# Altium schematic symbol library Jump.SchLib: 10 symbols
Pins are listed as number, name and electrical type; pins without a type are passive.

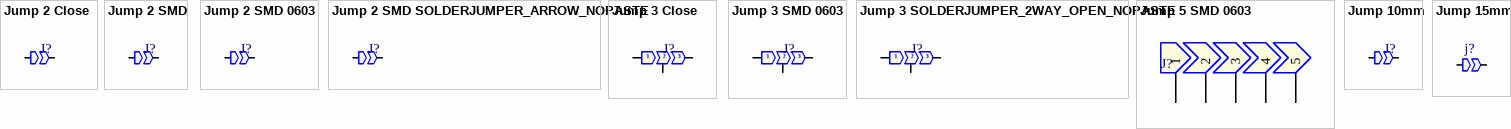
[diagram p0: symbols Jump 2 Close to Jump 15mm]

## Jump 2 Close
designator J?, comment JP2-Close  (value not drawn)
Jumper, 2-Pin, Nho them hang rao; Code: 3504-001; Code_sub1: 3504-028 * 0.05pcs
footprint JUMP2-CLOSED
pins: 1, 2

## Jump 2 SMD
designator J?, comment Jump  (value not drawn)  (no BOM)
Jumper, SMD; Rule: UNIONINDEX=0|RULEKIND=Clearance|NETSCOPE=DifferentNets|LAYERKIND=SameLayer|NAME=Schematic Clearance Constraint|GAP=10mil|GENERICCLEARANCE=10mil|IGNOREPADTOPADCLEARANCEINFOOTPRINT=FALSE|OBJECTCLEARANCES=ClearanceObj_Arc-ClearanceObj_Hole:0;ClearanceObj_Track-ClearanceObj_Hole:0;ClearanceObj_SMDPad-ClearanceObj_Hole:0;ClearanceObj_THPad-ClearanceObj_Hole:0;ClearanceObj_Via-ClearanceObj_Hole:0;ClearanceObj_Fill-ClearanceObj_Hole:0;ClearanceObj_Poly-ClearanceObj_Hole:0;ClearanceObj_Region-ClearanceObj_Region:50000;ClearanceObj_Region-ClearanceObj_Hole:0;ClearanceObj_Text-ClearanceObj_Hole:0|UNIT=Imperial
footprint JP_0603 (CHIP Resistor 1/10 WATT, 1.6x0.8mm, 0603, 1608)
pins: 1, 2

## Jump 2 SMD 0603
designator J?, comment JP2-SMD  (value not drawn)  (no BOM)
Jumper 3
footprint JUMP2 SMD 0603
pins: 1, 2

## Jump 2 SMD SOLDERJUMPER_ARROW_NOPASTE
designator J?, comment JP2-SMD  (value not drawn)  (no BOM)
Jump 2 SMD SOLDERJUMPER_ARROW_NOPASTE
footprint J2-SMD SOLDERJUMPER_ARROW_NOPASTE
pins: 1, 2

## Jump 3 Close
designator J?, comment JP3-Close  (value not drawn)
Jumper, 3-Pin; Code: 3504-001; Code_sub1: 3504-028 * 0.1pcs
footprint JUMP3-CLOSED
pins: 1, 2, 3

## Jump 3 SMD 0603
designator J?, comment JP3-SMD  (value not drawn)  (no BOM)
Jumper 3 Han
footprint JUMP3 SMD 0603
pins: 1, 2, 3

## Jump 3 SOLDERJUMPER_2WAY_OPEN_NOPASTE
designator J?, comment JP3-SMD  (value not drawn)  (no BOM)
SOLDERJUMPER_2WAY_OPEN_NOPASTE
footprint J3-SOLDERJUMPER_2WAY_OPEN_NOPASTE
pins: 1, 2, 3

## Jump 5 SMD 0603
designator J?, comment JP5-SMD  (value not drawn)  (no BOM)
Jumper 5
footprint JUMP5 SMD 0603
pins: 1, 2, 3, 4, 5

## Jump 10mm
designator J?, comment J10mm  (value not drawn)  (no BOM)
Jumper, 2-Pin, Nho them hang rao; Code: 3208-009
footprint Jump 10mm
pins: 1, 2

## Jump 15mm
designator j?  (value not drawn)
Jumper; Code: 3208-008
footprint Jump 0.5x5x15
pins: 1, 2